# Altium footprint library leadless.PcbLib: 98 footprints (part 1 of 7)
Each footprint in its own frame and in the unit in brackets; x right, y up, seen from the top. Pads: shape width x height; smd on the part's side, far side on the other; paste and mask are expansions set on the pad; w line width, h text height; cw(c..) or ccw(c..) is an arc to the next point about the centre after c.
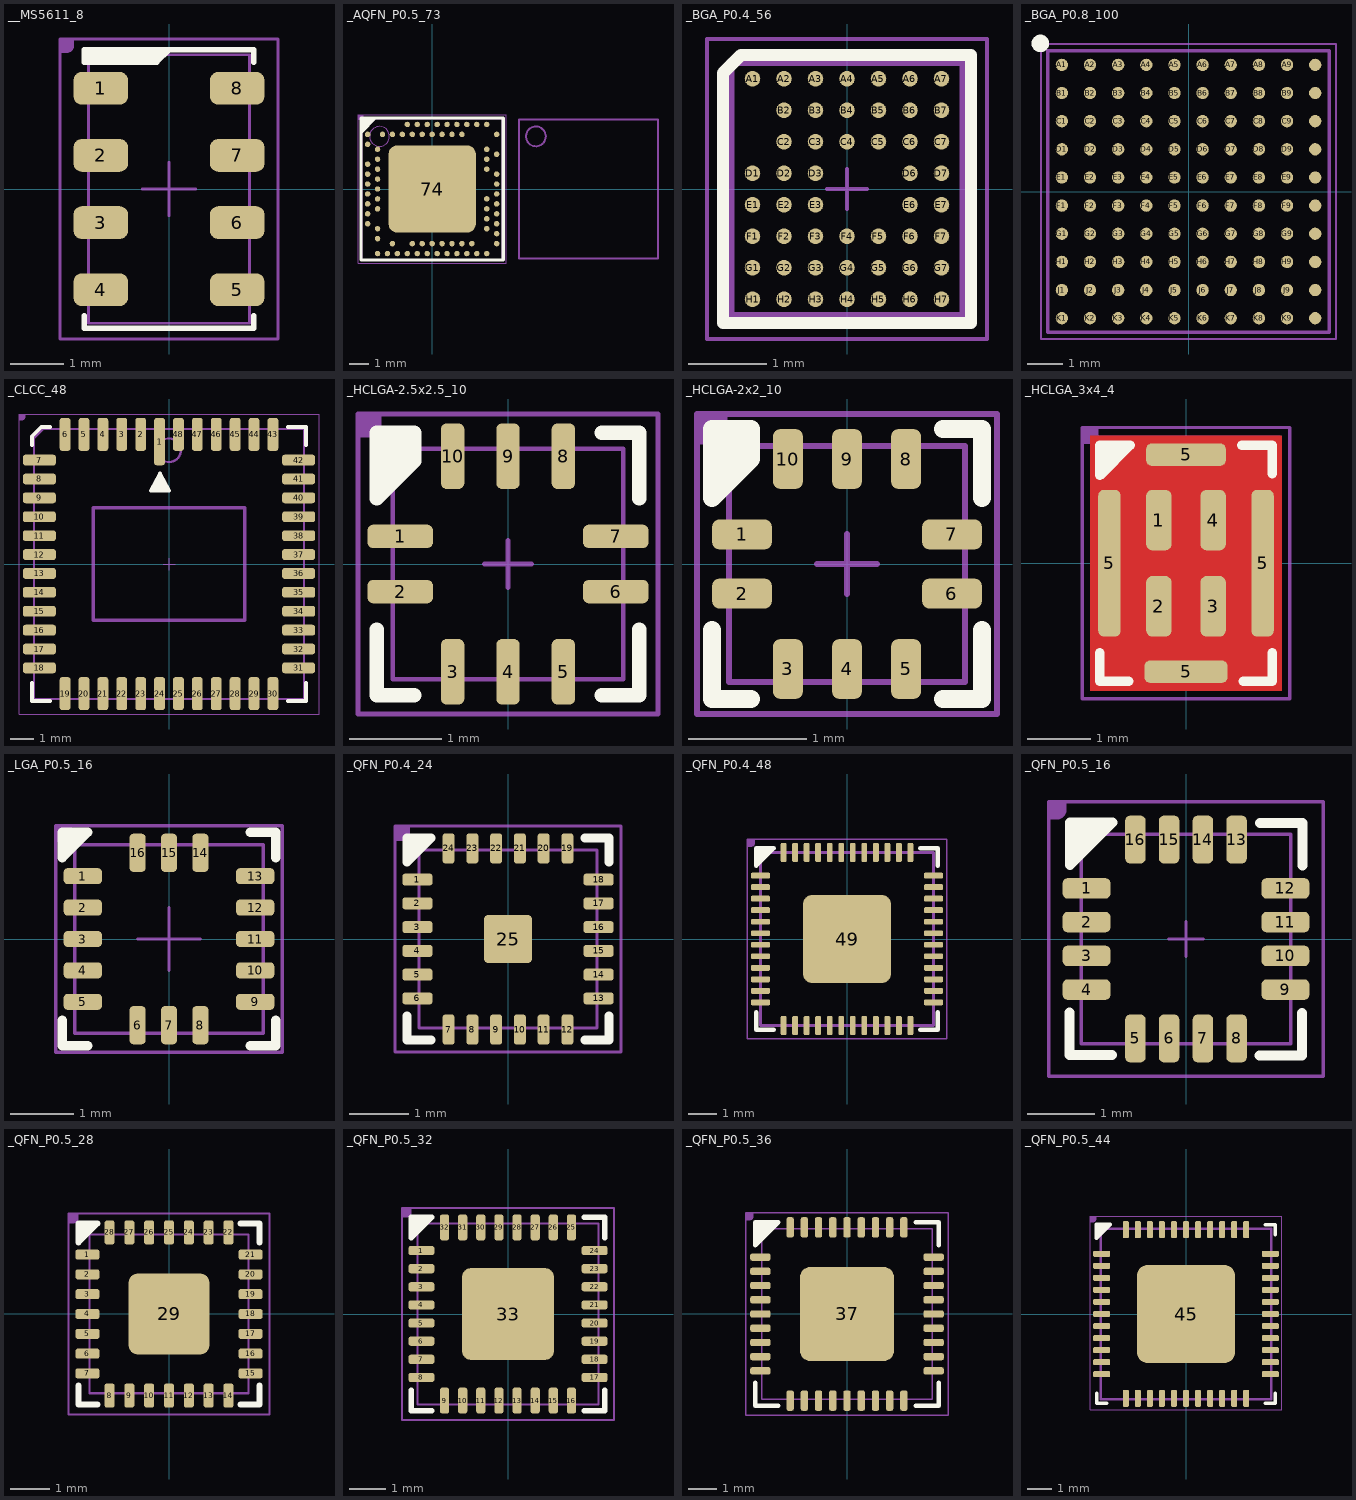
[diagram p0: the footprints below, top view; thin cyan lines are the x and y axes]

## __MS5611_8 [mil]
height 39.37
pads (8):
  rrect50% 40x24 smd: 1(-50,73.82) 2(-50,24.61) 3(-50,-24.61) 4(-50,-73.82) 5(50,-73.82) 6(50,-24.61) 7(50,24.61) 8(50,73.82)
Top Overlay:
  region: -62,102 0,102 -9,93 -62,93
  lines w4: -62,-93 -62,-102 62,-102 62,-93 ; 0,102 -9,93 -62,93 -62,102 62,102 62,93
Mechanical 13:
  lines w2: -19.68,0 19.68,0 ; 0,-19.68 0,19.68 ; -59.06,-98.43 -59.06,98.43 59.06,98.43 59.06,-98.43 -59.06,-98.43
Top Component:
  region: -80,110 -70,110 -70,105 -70,104.01 -70.76,102.17 -72.17,100.76 -74.01,100 -75,100 -80,100
  lines w2: -80,-110 80,-110 80,110 -80,110 -80,-110
  text ".Designator" at -40,-28 h100
3D body "User Library-ms5611_STEP.step": height 40.16, standoff -0.39, extent -59.05,-98.42 59.06,98.43

## _AQFN_P0.5_73 [mm]
height 0.85
pads (74):
  rrect20% 4.4x4.4 smd mask+0.05: 74(0,0)
  round 0.275 smd paste+0.012 mask+0.05: A8(-1.25,3.25) A10(-0.75,3.25) A12(-0.25,3.25) A14(0.25,3.25) A16(0.75,3.25) A18(1.25,3.25) A20(1.75,3.25) A22(2.25,3.25) A23(2.75,3.25) AA24(3.25,-2.25) AB2(-2.75,-2.5) AC5(-2,-2.75) AC9(-1,-2.75) AC11(-0.5,-2.75) AC13(0,-2.75) AC15(0.5,-2.75) AC17(1,-2.75) AC19(1.5,-2.75) AC21(2,-2.75) AC24(3.25,-2.75) AD2(-2.75,-3.25) AD4(-2.25,-3.25) AD6(-1.75,-3.25) AD8(-1.25,-3.25) AD10(-0.75,-3.25) AD12(-0.25,-3.25) AD14(0.25,-3.25) AD16(0.75,-3.25) AD18(1.25,-3.25) AD20(1.75,-3.25) AD22(2.25,-3.25) AD23(2.75,-3.25) B1(-3.25,2.75) B3(-2.5,2.75) B5(-2,2.75) B7(-1.5,2.75) B9(-1,2.75) B11(-0.5,2.75) B13(0,2.75) B15(0.5,2.75) B17(1,2.75) B19(1.5,2.75) B24(3.25,2.75) C1(-3.25,2.25) D2(-2.75,2) D23(2.75,2) E24(3.25,1.75) F2(-2.75,1.5) F23(2.75,1.5) G1(-3.25,1.25) H2(-2.75,1) H23(2.75,1) J1(-3.25,0.75) J24(3.25,0.75) K2(-2.75,0.5) L1(-3.25,0.25) L24(3.25,0.25) M2(-2.75,0) N1(-3.25,-0.25) N24(3.25,-0.25) P2(-2.75,-0.5) P23(2.75,-0.5) R1(-3.25,-0.75) R24(3.25,-0.75) T2(-2.75,-1) T23(2.75,-1) U1(-3.25,-1.25) U24(3.25,-1.25) V23(2.75,-1.5) W1(-3.25,-1.75) W24(3.25,-1.75) Y2(-2.75,-2) Y23(2.75,-2)
Top Overlay:
  region: -2.769,3.581 -3.581,2.769 -3.581,3.581
  lines w0.152: -3.581,-3.581 3.581,-3.581 3.581,3.581 -3.581,3.581 -3.581,-3.581
Mechanical 7:
  circle w0.1: c5.224,2.65 r0.5
  lines w0.1: 4.374,-3.5 11.374,-3.5 11.374,3.5 4.374,3.5 4.374,-3.5
  text ".Designator" at 7.124,-0.25 h0.38
Mechanical 13:
  circle w0.051: c-2.65,2.65 r0.5
  lines w0.051: -0.5,0 0.5,0 ; 0,-0.5 0,0.5 ; -3.531,-3.531 3.531,-3.531 3.531,3.531 -3.531,3.531 -3.531,-3.531
Top Component:
  region: -3.734,3.734 -3.48,3.734 -3.48,3.607 -3.48,3.582 -3.499,3.535 -3.535,3.499 -3.582,3.48 -3.607,3.48 -3.734,3.48
  lines w0.051: -3.734,-3.734 -3.734,3.734 3.734,3.734 3.734,-3.734 -3.734,-3.734
  text ".Designator" at -1.016,-0.686 h2.54
3D body "LGA88C25P25X25_700X700X85.step": height 0.85, standoff 0, extent -3.55,-3.55 3.55,3.55

## _BGA_P0.4_56 [mm]
height 0.4
pads (50):
  round 0.198 smd: A1(-1.2,1.4) A2(-0.8,1.4) A3(-0.4,1.4) A4(0,1.4) A5(0.4,1.4) A6(0.8,1.4) A7(1.2,1.4) B2(-0.8,1) B3(-0.4,1) B4(0,1) B5(0.4,1) B6(0.8,1) B7(1.2,1) C2(-0.8,0.6) C3(-0.4,0.6) C4(0,0.6) C5(0.4,0.6) C6(0.8,0.6) C7(1.2,0.6) D1(-1.2,0.2) D2(-0.8,0.2) D3(-0.4,0.2) D6(0.8,0.2) D7(1.2,0.2) E1(-1.2,-0.2) E2(-0.8,-0.2) E3(-0.4,-0.2) E6(0.8,-0.2) E7(1.2,-0.2) F1(-1.2,-0.6) F2(-0.8,-0.6) F3(-0.4,-0.6) F4(0,-0.6) F5(0.4,-0.6) F6(0.8,-0.6) F7(1.2,-0.6) G1(-1.2,-1) G2(-0.8,-1) G3(-0.4,-1) G4(0,-1) G5(0.4,-1) G6(0.8,-1) G7(1.2,-1) H1(-1.2,-1.4) H2(-0.8,-1.4) H3(-0.4,-1.4) H4(0,-1.4) H5(0.4,-1.4) H6(0.8,-1.4) H7(1.2,-1.4)
Top Overlay:
  lines w0.152: -1.575,-1.702 1.575,-1.702 1.575,1.702 -1.346,1.702 -1.575,1.473 -1.575,-1.702
Mechanical 13:
  lines w0.051: -0.254,0 0.254,0 ; 0,-0.254 0,0.254
  lines w0.1: -1.48,-1.615 1.48,-1.615 1.48,1.615 -1.48,1.615 -1.48,-1.615
Top Component:
  lines w0.051: -1.778,-1.905 1.778,-1.905 1.778,1.905 -1.778,1.905 -1.778,-1.905
  text ".Designator" at -1.016,-0.737 h2.54
3D body "BGA56C40P7X8_296X323X40.step": height 0.4, standoff 0, extent -1.48,-1.615 1.48,1.615

## _BGA_P0.8_100 [mm]
height 1.1
pads (100):
  round 0.35 smd: A1(-3.6,3.6) A2(-2.8,3.6) A3(-2,3.6) A4(-1.2,3.6) A5(-0.4,3.6) A6(0.4,3.6) A7(1.2,3.6) A8(2,3.6) A9(2.8,3.6) A10(3.6,3.6) B1(-3.6,2.8) B2(-2.8,2.8) B3(-2,2.8) B4(-1.2,2.8) B5(-0.4,2.8) B6(0.4,2.8) B7(1.2,2.8) B8(2,2.8) B9(2.8,2.8) B10(3.6,2.8) C1(-3.6,2) C2(-2.8,2) C3(-2,2) C4(-1.2,2) C5(-0.4,2) C6(0.4,2) C7(1.2,2) C8(2,2) C9(2.8,2) C10(3.6,2) D1(-3.6,1.2) D2(-2.8,1.2) D3(-2,1.2) D4(-1.2,1.2) D5(-0.4,1.2) D6(0.4,1.2) D7(1.2,1.2) D8(2,1.2) D9(2.8,1.2) D10(3.6,1.2) E1(-3.6,0.4) E2(-2.8,0.4) E3(-2,0.4) E4(-1.2,0.4) E5(-0.4,0.4) E6(0.4,0.4) E7(1.2,0.4) E8(2,0.4) E9(2.8,0.4) E10(3.6,0.4) F1(-3.6,-0.4) F2(-2.8,-0.4) F3(-2,-0.4) F4(-1.2,-0.4) F5(-0.4,-0.4) F6(0.4,-0.4) F7(1.2,-0.4) F8(2,-0.4) F9(2.8,-0.4) F10(3.6,-0.4) G1(-3.6,-1.2) G2(-2.8,-1.2) G3(-2,-1.2) G4(-1.2,-1.2) G5(-0.4,-1.2) G6(0.4,-1.2) G7(1.2,-1.2) G8(2,-1.2) G9(2.8,-1.2) G10(3.6,-1.2) H1(-3.6,-2) H2(-2.8,-2) H3(-2,-2) H4(-1.2,-2) H5(-0.4,-2) H6(0.4,-2) H7(1.2,-2) H8(2,-2) H9(2.8,-2) H10(3.6,-2) J1(-3.6,-2.8) J2(-2.8,-2.8) J3(-2,-2.8) J4(-1.2,-2.8) J5(-0.4,-2.8) J6(0.4,-2.8) J7(1.2,-2.8) J8(2,-2.8) J9(2.8,-2.8) J10(3.6,-2.8) K1(-3.6,-3.6) K2(-2.8,-3.6) K3(-2,-3.6) K4(-1.2,-3.6) K5(-0.4,-3.6) K6(0.4,-3.6) K7(1.2,-3.6) K8(2,-3.6) K9(2.8,-3.6) K10(3.6,-3.6)
Top Overlay:
  circle w0.25: c-4.21,4.21 r0.125
Mechanical 13:
  lines w0.1: -4,-4 -4,4 4,4 4,-4 -4,-4
Top Component:
  lines w0.051: -4.191,-4.191 -4.191,4.191 4.191,4.191 4.191,-4.191 -4.191,-4.191
  text ".Designator" at -1.016,-0.711 h2.54
3D body "BGA100C80P10X10_800X800X110.step": height 1.1, standoff 0, extent -4,-4 4,4

## _CLCC_48 [mil]
height 90.55
pads (48):
  rrect50% 18x79 smd: 1(-15.75,204)
  rrect50% 18x55 smd: 2(-47.24,216) 3(-78.74,216) 4(-110.24,216) 5(-141.73,216) 6(-173.23,216) 19(-173.23,-216) 20(-141.73,-216) 21(-110.24,-216) 22(-78.74,-216) 23(-47.24,-216) 24(-15.75,-216) 25(15.75,-216) 26(47.24,-216) 27(78.74,-216) 28(110.24,-216) 29(141.73,-216) 30(173.23,-216) 43(173.23,216) 44(141.73,216) 45(110.24,216) 46(78.74,216) 47(47.24,216) 48(15.75,216)
  rrect50% 55x18 smd: 7(-216,173.23) 8(-216,141.73) 9(-216,110.24) 10(-216,78.74) 11(-216,47.24) 12(-216,15.75) 13(-216,-15.75) 14(-216,-47.24) 15(-216,-78.74) 16(-216,-110.24) 17(-216,-141.73) 18(-216,-173.23) 31(216,-173.23) 32(216,-141.73) 33(216,-110.24) 34(216,-78.74) 35(216,-47.24) 36(216,-15.75) 37(216,15.75) 38(216,47.24) 39(216,78.74) 40(216,110.24) 41(216,141.73) 42(216,173.23)
Top Overlay:
  region: -15,151 -30.26,122 0.26,122
  lines w6: -228.35,-197.83 -228.35,-228.35 -197.83,-228.35 ; -228.35,197.83 -228.35,213.09 -213.09,228.35 -197.83,228.35 ; 197.83,-228.35 228.35,-228.35 228.35,-197.83 ; 197.83,228.35 228.35,228.35 228.35,197.83 ; -30.26,122 -15,151 0.26,122 -30.26,122
Mechanical 13:
  circle w3.94: c0,189.57 r19.68
  lines w2: -10,0 10,0 ; 0,-10 0,10
  lines w3.94: -225,-225 225,-225 225,225 -209.74,225 -225,209.74 -225,-225
  lines w6: -126,-94 126,-94 126,94 -126,94 -126,-94
Top Component:
  region: -250,250 -240,250 -240,245 -240,244.01 -240.76,242.17 -242.17,240.76 -244.01,240 -245,240 -250,240
  lines w2: -250,-250 -250,250 250,250 250,-250 -250,-250
  text ".Designator" at -41,-28 h100
3D body "User Library-CLCC48.STEP": height 79.69, standoff 0, extent -250,-250 250,250

## _HCLGA-2.5x2.5_10 [mil]
height 31.5
pads (10):
  rrect50% 28x10 smd: 1(-46,11.81) 2(-46,-11.81) 6(46,-11.81) 7(46,11.81)
  rrect50% 10x28 smd: 3(-23.62,-46) 4(0,-46) 5(23.62,-46) 8(23.62,46) 9(0,46) 10(-23.62,46)
Top Overlay:
  region: -40,44 -40,56 -56,56 -56,28
  lines w6: -56,-28 -56,-56 -40,-56 ; 40,-56 56,-56 56,-28 ; 40,56 56,56 56,28 ; -56,28 -56,56 -40,56 -40,44 -56,28
Top Solder:
  region: -32,-11.81 -32,11.81 -60,11.81 -60,-11.81
  region: 60,-11.81 60,11.81 32,11.81 32,-11.81
  region: 23.62,-32 -23.62,-32 -23.62,-60 23.62,-60
  rectangle: -23.62,32 23.62,60
Mechanical 13:
  lines w2: -10,0 10,0 ; 0,-10 0,10 ; -49.21,-49.21 49.22,-49.21 49.22,49.22 -49.21,49.22 -49.21,-49.21
Top Component:
  region: -64,64 -54,64 -54,59 -54,58.01 -54.76,56.17 -56.17,54.76 -58.01,54 -59,54 -64,54
  lines w2: -64,-64 64,-64 64,64 -64,64 -64,-64
  text ".Designator" at -41,-27 h100
3D body "PQFN60P250X250X80-10N.step": height 31.5, standoff -0.04, extent -49.21,-49.21 49.22,49.22

## _HCLGA-2x2_10 [mil]
height 31.5
pads (10):
  rrect50% 20x10 smd: 1(-35,9.84) 2(-35,-9.84) 6(35,-9.84) 7(35,9.84)
  rrect50% 10x20 smd: 3(-19.68,-35) 4(0,-35) 5(19.68,-35) 8(19.68,35) 9(0,35) 10(-19.68,35)
Top Overlay:
  region: -32,45 -45,45 -45,22 -32,35
  lines w6: -45,-22 -45,-45 -32,-45 ; 32,-45 45,-45 45,-22 ; 32,45 45,45 45,22 ; -45,22 -32,35 -32,45 -45,45 -45,22
Top Solder:
  rectangle: -19.68,-45 19.68,-25
  region: 19.68,45 -19.68,45 -19.68,25 19.68,25
  region: 45,-9.84 45,9.84 25,9.84 25,-9.84
  region: -25,-9.84 -25,9.84 -45,9.84 -45,-9.84
Mechanical 13:
  lines w2: -10,0 10,0 ; 0,-10 0,10 ; -39.37,-39.37 39.37,-39.37 39.37,39.37 -39.37,39.37 -39.37,-39.37
Top Component:
  region: -50,50 -40,50 -40,45 -40,44.01 -40.76,42.17 -42.17,40.76 -44.01,40 -45,40 -50,40
  lines w2: -50,-50 50,-50 50,50 -50,50 -50,-50
  text ".Designator" at -40.76,-28 h100
3D body "PQFN50P200X200X80-10N.step": height 31.5, standoff -0.04, extent -39.37,-39.37 39.37,39.37

## _HCLGA_3x4_4 [mil]
pads (8):
  rrect50% 16x38 smd: 1(-17,27) 2(-17,-27) 3(17,-27) 4(17,27)
  rrect50% 14x92 smd: 5(-48,0) 5(48,0)
  rrect50% 52x14 smd: 5(0,-68)
  rrect50% 50x14 smd: 5(0,68)
Top Layer:
  pour cut-out: -60,80 60,80 60,-80 -60,-80
Top Overlay:
  region: -54,74 -35,74 -54,55
  lines w6: -54,-56 -54,-74 -36,-74 ; 35,74 54,74 54,56 ; 36,-74 54,-74 54,-56 ; -54,55 -54,74 -35,74 -54,55
Mechanical 13:
  lines w2: -10,0 10,0 ; 0,-10 0,10 ; -59,-79 59,-79 59,79 -59,79 -59,-79
Top Component:
  region: -65,85 -55,85 -55,80 -55,79.01 -55.76,77.17 -57.17,75.76 -59.01,75 -60,75 -65,75
  lines w2: -65,-85 -65,85 65,85 65,-85 -65,-85
  text ".Designator" at -40,-27 h100
3D body "User Library-DFN12(3x4).STEP": height 29.92, standoff 0, extent -59.08,-78.74 59.1,78.74

## _LGA_P0.5_16 [mil]
height 29.53
pads (16):
  rrect50% 24x10 smd: 1(-54,39.37) 2(-54,19.68) 3(-54,0) 4(-54,-19.68) 5(-54,-39.37) 9(54,-39.37) 10(54,-19.68) 11(54,0) 12(54,19.68) 13(54,39.37)
  rrect50% 10x24 smd: 6(-19.68,-54) 7(0,-54) 8(19.68,-54) 14(19.68,54) 15(0,54) 16(-19.68,54)
Top Overlay:
  region: -67,67 -51,67 -67,51
  lines w6: -67,-51 -67,-67 -51,-67 ; 51,-67 67,-67 67,-51 ; 51,67 67,67 67,51 ; -67,51 -67,67 -51,67 -67,51
Top Solder:
  region: 20,-41 -20,-41 -20,-67 20,-67
  region: -41,-40 -41,40 -67,40 -67,-40
  region: 41,40 41,-40 67,-40 67,40
  rectangle: -20,41 20,67
Mechanical 13:
  lines w2: -19.68,0 19.68,0 ; 0,-19.68 0,19.68 ; -59.06,-59.06 59.06,-59.06 59.06,59.06 -59.06,59.06 -59.06,-59.06
Top Component:
  region: -71,71 -61,71 -61,66 -61,65.01 -61.76,63.17 -63.17,61.76 -65.01,61 -66,61 -71,61
  lines w2: -71,-71 71,-71 71,71 -71,71 -71,-71
  text ".Designator" at -40,-29 h100
3D body "PQFN50P300X300X75-16L.step": height 29.53, standoff 0, extent -59.06,-59.06 59.06,59.06

## _QFN_P0.4_24 [mil]
height 39.37
pads (25):
  rrect50% 20x8 smd: 1(-60,39.37) 2(-60,23.62) 3(-60,7.87) 4(-60,-7.87) 5(-60,-23.62) 6(-60,-39.37) 13(60,-39.37) 14(60,-23.62) 15(60,-7.87) 16(60,7.87) 17(60,23.62) 18(60,39.37)
  rrect50% 8x20 smd: 7(-39.37,-60) 8(-23.62,-60) 9(-7.87,-60) 10(7.87,-60) 11(23.62,-60) 12(39.37,-60) 19(39.37,60) 20(23.62,60) 21(7.87,60) 22(-7.87,60) 23(-23.62,60) 24(-39.37,60)
  rrect20% 32x32 smd: 25(0,0)
Top Overlay:
  region: -67,67 -51,67 -67,51
  lines w6: -67,-51 -67,-67 -51,-67 ; 51,-67 67,-67 67,-51 ; 51,67 67,67 67,51 ; -67,51 -67,67 -51,67 -67,51
Top Solder:
  rectangle: -39.37,-70 39.37,-50
  region: 50,39.37 50,-39.37 70,-39.37 70,39.37
  rectangle: -39.37,50 39.37,70
  region: -70,39.37 -70,-39.37 -50,-39.37 -50,39.37
Mechanical 13:
  lines w2: -10,0 10,0 ; 0,-10 0,10 ; -59.05,-59.06 59.06,-59.06 59.06,59.06 -59.05,59.06 -59.05,-59.06
Top Component:
  region: -75,75 -65,75 -65,70 -65,69.01 -65.76,67.17 -67.17,65.76 -69.01,65 -70,65 -75,65
  lines w2: -75,-75 -75,75 75,75 75,-75 -75,-75
  text ".Designator" at -40,-28 h100
3D body "QFN40P300X300X100-24L.step": height 39.37, standoff 0, extent -59.84,-59.84 59.85,59.85

## _QFN_P0.4_48 [mil]
height 35.43
pads (49):
  rrect50% 26x8 smd: 1(-118,86.61) 2(-118,70.87) 3(-118,55.12) 4(-118,39.37) 5(-118,23.62) 6(-118,7.87) 7(-118,-7.87) 8(-118,-23.62) 9(-118,-39.37) 10(-118,-55.12) 11(-118,-70.87) 12(-118,-86.61) 25(118,-86.61) 26(118,-70.87) 27(118,-55.12) 28(118,-39.37) 29(118,-23.62) 30(118,-7.87) 31(118,7.87) 32(118,23.62) 33(118,39.37) 34(118,55.12) 35(118,70.87) 36(118,86.61)
  rrect50% 8x26 smd: 13(-86.61,-118) 14(-70.87,-118) 15(-55.12,-118) 16(-39.37,-118) 17(-23.62,-118) 18(-7.87,-118) 19(7.87,-118) 20(23.62,-118) 21(39.37,-118) 22(55.12,-118) 23(70.87,-118) 24(86.61,-118) 37(86.61,118) 38(70.87,118) 39(55.12,118) 40(39.37,118) 41(23.62,118) 42(7.87,118) 43(-7.87,118) 44(-23.62,118) 45(-39.37,118) 46(-55.12,118) 47(-70.87,118) 48(-86.61,118)
  rrect20% 120x120 smd: 49(0,0)
Top Overlay:
  region: -124.02,124.02 -100,124.02 -124.02,100
  lines w6: -124.02,-100 -124.02,-124.02 -100,-124.02 ; 100,-124.02 124.02,-124.02 124.02,-100 ; 100,124.02 124.02,124.02 124.02,100 ; -124.02,100 -124.02,124.02 -100,124.02 -124.02,100
Top Solder:
  rectangle: -86.61,-133 86.61,-103
  rectangle: -86.61,103 86.61,133
  region: 103,86.61 103,-86.61 133,-86.61 133,86.61
  region: -133,86.61 -133,-86.61 -103,-86.61 -103,86.61
Mechanical 13:
  lines w2: -10,0 10,0 ; 0,-10 0,10
  lines w3.94: -118.11,-118.11 -118.11,118.11 118.11,118.11 118.11,-118.11 -118.11,-118.11
Top Component:
  region: -136,136 -126,136 -126,131 -126,130.01 -126.76,128.17 -128.17,126.76 -130.01,126 -131,126 -136,126
  lines w2: -136,-136 -136,136 136,136 136,-136 -136,-136
  text ".Designator" at -41,-28 h100
3D body "QFN40P600X600X90_HS-49N.step": height 35.43, standoff -0.04, extent -118.15,-118.15 118.15,118.15

## _QFN_P0.5_16 [mil]
height 23.62
pads (16):
  rrect50% 28x12 smd: 1(-58,29.53) 2(-58,9.84) 3(-58,-9.84) 4(-58,-29.53) 9(58,-29.53) 10(58,-9.84) 11(58,9.84) 12(58,29.53)
  rrect50% 12x28 smd: 5(-29.53,-58) 6(-9.84,-58) 7(9.84,-58) 8(29.53,-58) 13(29.53,58) 14(9.84,58) 15(-9.84,58) 16(-29.53,58)
Top Overlay:
  region: -67.67,68 -43,68 -67.67,43.33
  lines w6: -68,-43 -68,-67.67 -43.33,-67.67 ; 43,-68 67.67,-68 67.67,-43.33 ; 43.33,67.67 68,67.67 68,43 ; -67.67,43.33 -43,68 -67.67,68 -67.67,43.33
Top Solder:
  region: 72,29.53 44,29.53 44,-29.53 72,-29.53
  region: -29.53,72 -29.53,44 29.53,44 29.53,72
  region: 29.53,-72 29.53,-44 -29.53,-44 -29.53,-72
  rectangle: -72,-29.53 -44,29.53
Mechanical 13:
  lines w2: -10,0 10,0 ; 0,-10 0,10 ; -61.02,-61.02 -61.02,61.02 61.02,61.02 61.02,-61.02 -61.02,-61.02
Top Component:
  region: -80,80 -70,80 -70,75 -70,74.01 -70.76,72.17 -72.17,70.76 -74.01,70 -75,70 -80,70
  lines w2: -80,-80 80,-80 80,80 -80,80 -80,-80
  text ".Designator" at -40,-29 h100
3D body "QFN50P300X300X100-16N.step": height 39.37, standoff 0, extent -59.05,-59.05 59.06,59.06

## _QFN_P0.5_28 [mil]
height 23.62
pads (29):
  rrect50% 24x10 smd: 1(-81,59.06) 2(-81,39.37) 3(-81,19.68) 4(-81,0) 5(-81,-19.68) 6(-81,-39.37) 7(-81,-59.06) 15(81,-59.06) 16(81,-39.37) 17(81,-19.68) 18(81,0) 19(81,19.68) 20(81,39.37) 21(81,59.06)
  rrect50% 10x24 smd: 8(-59.06,-81) 9(-39.37,-81) 10(-19.68,-81) 11(0,-81) 12(19.68,-81) 13(39.37,-81) 14(59.06,-81) 22(59.06,81) 23(39.37,81) 24(19.68,81) 25(0,81) 26(-19.68,81) 27(-39.37,81)
  rrect50% 9.84x24 smd: 28(-59.06,81)
  rrect20% 80x80 smd: 29(0,0)
Top Overlay:
  region: -90,90 -71,90 -90,71
  lines w6: -90,-71 -90,-90 -71,-90 ; 71,-90 90,-90 90,-71 ; 71,90 90,90 90,71 ; -90,71 -90,90 -71,90 -90,71
Top Solder:
  rectangle: -93,-68 -69,68.06
  region: 68,-93 68,-69 -68.05,-69 -68.05,-93
  region: 93,68 69,68 69,-68.06 93,-68.06
  region: -68,93 -68,69 68,69 68,93
Mechanical 13:
  lines w2: -10,0 10,0 ; 0,-10 0,10 ; -78.74,-78.74 -78.74,78.74 78.74,78.74 78.74,-78.74 -78.74,-78.74
Top Component:
  region: -100,100 -90,100 -90,95 -90,94.01 -90.76,92.17 -92.17,90.76 -94.01,90 -95,90 -100,90
  lines w2: -100,-100 100,-100 100,100 -100,100 -100,-100
  text ".Designator" at -24,-16 h100
3D body "QFN50P400X400X55-28L.step": height 21.65, standoff 0, extent -78.78,-78.78 78.78,78.78

## _QFN_P0.5_32 [mil]
height 39.37
pads (33):
  rrect50% 28x10 smd: 1(-94,68.9) 2(-94,49.21) 3(-94,29.53) 4(-94,9.84) 5(-94,-9.84) 6(-94,-29.53) 7(-94,-49.21) 8(-94,-68.9) 17(94,-68.9) 18(94,-49.21) 19(94,-29.53) 20(94,-9.84) 21(94,9.84) 22(94,29.53) 23(94,49.21) 24(94,68.9)
  rrect50% 10x28 smd: 9(-68.9,-94) 10(-49.21,-94) 11(-29.53,-94) 12(-9.84,-94) 13(9.84,-94) 14(29.53,-94) 15(49.21,-94) 16(68.9,-94) 25(68.9,94) 26(49.21,94) 27(29.53,94) 28(9.84,94) 29(-9.84,94) 30(-29.53,94) 31(-49.21,94) 32(-68.9,94)
  rrect20% 100x100 smd: 33(0,0)
Top Overlay:
  region: -83,105 -105,105 -105,83
  lines w6: -105,-83 -105,-105 -83,-105 ; 83,-105 105,-105 105,-83 ; 83,105 105,105 105,83 ; -105,83 -83,105 -105,105 -105,83
Top Solder:
  region: 108,68.9 80,68.9 80,-68.9 108,-68.9
  region: -80,68.9 -108,68.9 -108,-68.9 -80,-68.9
  region: 68.9,-108 68.9,-80 -68.9,-80 -68.9,-108
  region: 68.9,80 68.9,108 -68.9,108 -68.9,80
Mechanical 13:
  lines w2: -10,0 10,0 ; 0,-10 0,10 ; -98.42,-98.42 98.43,-98.42 98.43,98.43 -98.42,98.43 -98.42,-98.42
Top Component:
  region: -115,115 -105,115 -105,110 -105,109.01 -105.76,107.17 -107.17,105.76 -109.01,105 -110,105 -115,105
  lines w2: -115,-115 115,-115 115,115 -115,115 -115,-115
  text ".Designator" at -41,-28 h100
3D body "QFN50P500X500X55-32L.step": height 21.65, standoff 0, extent -99.21,-99.21 99.22,99.22

## _QFN_P0.5_36 [mil]
height 39.37
pads (37):
  rrect50% 28x10 smd: 1(-120,78.74) 2(-120,59.06) 3(-120,39.37) 4(-120,19.69) 5(-120,0) 6(-120,-19.68) 7(-120,-39.37) 8(-120,-59.05) 9(-120,-78.74) 19(120,-78.74) 20(120,-59.05) 21(120,-39.37) 22(120,-19.68) 23(120,0) 24(120,19.68) 25(120,39.37) 26(120,59.06) 27(120,78.74)
  rrect50% 10x28 smd: 10(-78.74,-120) 11(-59.06,-120) 12(-39.37,-120) 13(-19.69,-120) 14(0,-120) 15(19.68,-120) 16(39.37,-120) 17(59.05,-120) 18(78.74,-120) 28(78.74,120) 29(59.05,120) 30(39.37,120) 31(19.68,120) 32(0,120) 33(-19.69,120) 34(-39.37,120) 35(-59.06,120) 36(-78.74,120)
  rrect20% 130x130 smd: 37(0,0)
Top Overlay:
  region: -127,127 -95,127 -127,95
  lines w6: -127,-95 -127,-127 -95,-127 ; 95,-127 127,-127 127,-95 ; 95,127 127,127 127,95 ; -127,95 -127,127 -95,127 -127,95
Top Solder:
  region: 87.74,106 87.74,134 -87.74,134 -87.74,106
  region: 87.74,-134 87.74,-106 -87.74,-106 -87.74,-134
  rectangle: 106,-87.74 134,87.74
  rectangle: -134,-87.74 -106,87.74
Mechanical 13:
  lines w2: -10,0 10,0 ; 0,-10 0,10 ; -118.11,-118.11 118.11,-118.11 118.11,118.11 -118.11,118.11 -118.11,-118.11
Top Component:
  region: -140,140 -130,140 -130,135 -130,134.01 -130.76,132.17 -132.17,130.76 -134.01,130 -135,130 -140,130
  lines w2: -140,-140 -140,140 140,140 140,-140 -140,-140
  text ".Designator" at -40,-27 h100
3D body "QFN50P600X600X90-36L.step": height 35.43, standoff 0, extent -118.89,-118.89 118.9,118.9

## _QFN_P0.5_44 [mil]
height 39.37
pads (45):
  rrect50% 28x10 smd: 1(-138,98.43) 2(-138,78.74) 3(-138,59.06) 4(-138,39.37) 5(-138,19.68) 6(-138,0) 7(-138,-19.69) 8(-138,-39.37) 9(-138,-59.06) 10(-138,-78.74) 11(-138,-98.43) 23(138,-98.43) 24(138,-78.74) 25(138,-59.05) 26(138,-39.37) 27(138,-19.68) 28(138,0) 29(138,19.69) 30(138,39.37) 31(138,59.06) 32(138,78.74) 33(138,98.43)
  rrect50% 10x28 smd: 12(-98.43,-138) 13(-78.74,-138) 14(-59.06,-138) 15(-39.37,-138) 16(-19.69,-138) 17(0,-138) 18(19.68,-138) 19(39.37,-138) 20(59.06,-138) 21(78.74,-138) 22(98.43,-138) 34(98.43,138) 35(78.74,138) 36(59.06,138) 37(39.37,138) 38(19.68,138) 39(0,138) 40(-19.69,138) 41(-39.37,138) 42(-59.06,138) 43(-78.74,138) 44(-98.43,138)
  rrect20% 160x160 smd: 45(0,0)
Top Overlay:
  region: -124.34,146.34 -146.34,146.34 -146.34,124.34
  lines w6: -145.76,-129.76 -145.76,-145.76 -129.76,-145.76 ; 129.76,-145.76 145.76,-145.76 145.76,-129.76 ; 129.76,145.76 145.76,145.76 145.76,129.76 ; -146.34,124.34 -146.34,146.34 -124.34,146.34 -146.34,124.34
Top Solder:
  region: 107.43,-152 107.43,-124 -107.43,-124 -107.43,-152
  region: 107.43,124 107.43,152 -107.43,152 -107.43,124
  rectangle: 124,-107.43 152,107.43
  rectangle: -152,-107.43 -124,107.43
Mechanical 13:
  lines w2: -10,0 10,0 ; 0,-10 0,10
  lines w4: -139.76,-139.76 -139.76,139.76 139.76,139.76 139.76,-139.76 -139.76,-139.76
Top Component:
  region: -157,160 -147,160 -147,155 -147,154.01 -147.76,152.17 -149.17,150.76 -151.01,150 -152,150 -157,150
  lines w2: -157,-157 157,-157 157,160 -157,160 -157,-157
  text ".Designator" at -40,-27 h100
3D body "User Library-smd_qfn-44-2.STEP": height 35.43, standoff 0, extent -137.82,-137.83 137.84,137.84